# EAGLE library part LSM6DSOXTR (library LSM6DSOXTR)
6-axis IMU (inertial measurement unit) with embedded AI: always-on 3-axis accelerometer and 3-axis gyroscope Source: Datasheet <https://www.st.com/resource/en/datasheet/lsm6dsox.pdf>
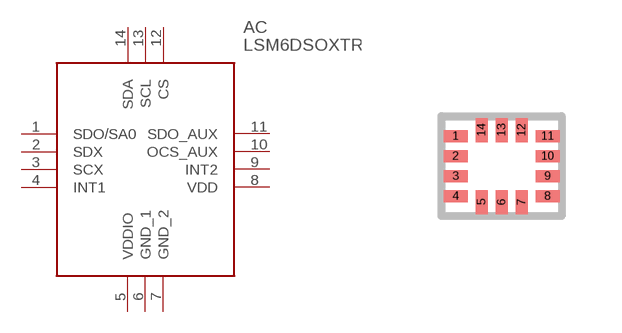
[diagram p0: symbol with the pads of LGA-14_1; footprint LGA-14_1]

Designator prefix AC

## LSM6DSOXTR (Description: 6-axis IMU (inertial measurement unit) with embedded AI: always-on 3-axis accelerometer and 3-axis gyroscope; Height: mm; Manufacturer_Name: STMicroelectronics; Manufacturer_Part_Number: LSM6DSOXTR; Mouser_Part_Number: 511-LSM6DSOXTR; Mouser_Price-Stock: https://www.mouser.co.uk/ProductDetail/STMicroelectronics/LSM6DSOXTR?qs=l7cgNqFNU1i9dcjzItLpVQ%3D%3D)  [LGA-14_1]
1  SDO/SA0
2  SDX
3  SCX
4  INT1
5  VDDIO
6  GND_1
7  GND_2
8  VDD
9  INT2
10  OCS_AUX
11  SDO_AUX
12  CS
13  SCL
14  SDA

## Footprint LGA-14_1 (pad centres in mm)
LGA-14_1
smd 0.6 x 0.3: 1 -1.15,0.75; 2 -1.15,0.25; 3 -1.15,-0.25; 4 -1.15,-0.75; 8 1.15,-0.75; 9 1.15,-0.25; 10 1.15,0.25; 11 1.15,0.75
smd 0.3 x 0.6: 5 -0.5,-0.9; 6 0,-0.9; 7 0.5,-0.9; 12 0.5,0.9; 13 0,0.9; 14 -0.5,0.9